# Altium schematic symbol library Conectores.SchLib: 4 symbols
Pins are listed as number, name and electrical type; pins without a type are passive.

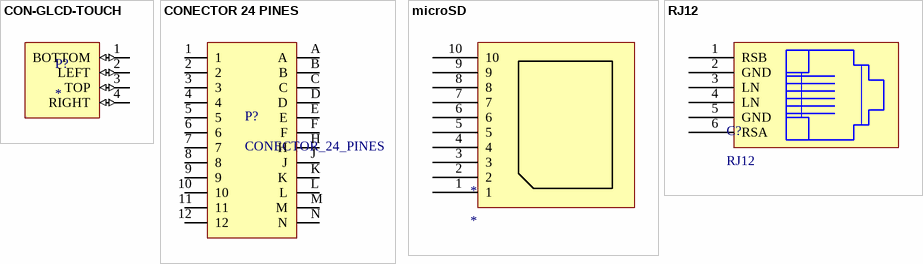
[diagram p0: symbols CON-GLCD-TOUCH to RJ12]

## CON-GLCD-TOUCH
designator P?
footprint CON-GLCD-TOUCH
pins: 1 BOTTOM (io), 2 LEFT (io), 3 TOP (io), 4 RIGHT (io)

## CONECTOR 24 PINES
designator P?, comment CONECTOR_24_PINES
footprint CONECTOR_24_PINES
pins: 1, 2, 3, 4, 5, 6, 7, 8, 9, 10, 11, 12, A, B, C, D, E, F, H, J, K, L, M, N

## microSD
designator *
footprint microSD_1
pins: 1, 2, 3, 4, 5, 6, 7, 8, 9, 10

## RJ12
designator C?
footprint RJ12_1
pins: 1 RSB, 2 GND, 3 LN, 4 LN, 5 GND, 6 RSA